# Altium footprint library 2019-09-10_07-03-39.PcbLib: 3 footprints
Each footprint in its own frame and in the unit in brackets; x right, y up, seen from the top. Pads: shape width x height; smd on the part's side, far side on the other; paste and mask are expansions set on the pad; w line width, h text height; cw(c..) or ccw(c..) is an arc to the next point about the centre after c.
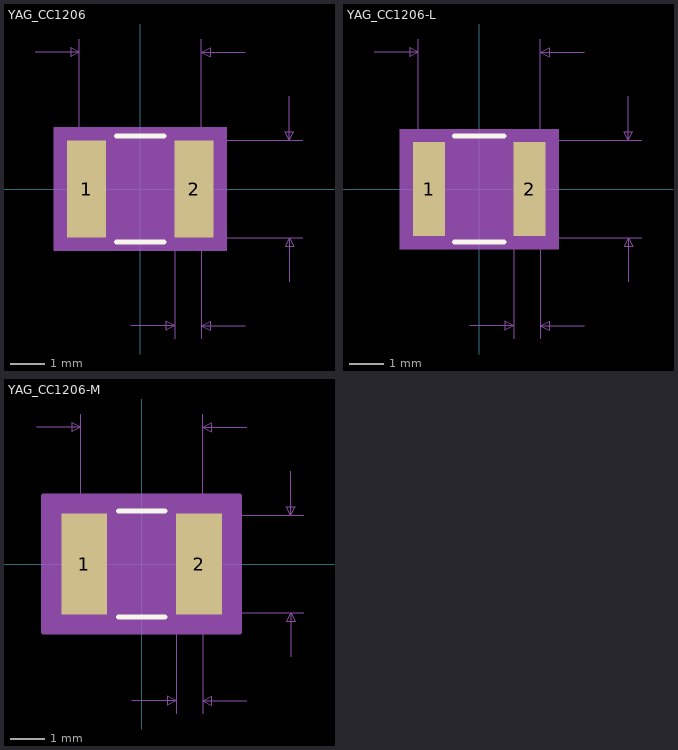
[diagram p0: the footprints below, top view; thin cyan lines are the x and y axes]

## YAG_CC1206 [mil]
pads (2):
  rect 44x110 smd paste+0 mask+0: 1(-61,0) 2(61,0)
Top Overlay:
  lines w6: -26.89,-60 26.89,-60 ; -26.89,60 26.89,60
Mechanical 5:
  region: 98,-70 -98,-70 -98,70 98,70
Mechanical 7:
  lines w1: -119,155 -69,155 ; -69,0 -69,170 ; -11,-155 39,-155 ; 0,-55 184,-55 ; 0,55 184,55 ; 39,-170 39,0 ; 69,-170 69,0 69,170 ; 119,-155 69,-155 ; 119,155 69,155 ; 169,-105 169,-55 ; 169,105 169,55 ; -69,155 -79,160 -79,150 -69,155 ; 39,-155 29,-150 29,-160 39,-155 ; 69,-155 79,-150 79,-160 69,-155 ; 69,155 79,160 79,150 69,155 ; 169,-55 164,-65 174,-65 169,-55 ; 169,55 164,65 174,65 169,55
  text "Default Padstyle: RX44Y110D0T" at -362.5,-325 h50
  text "Alternate 1 Padstyle: OX60Y90D30P" at -412.5,-425 h50
  text "Alternate 2 Padstyle: OX90Y60D30P" at -412.5,-525 h50
  text "0.11in/2.794mm" at 189,-12.5 h25
  text "0.138in/3.505mm" at -93.75,175 h25
  text "0.03in/0.762mm" at -33.5,-200 h25
Mechanical 13:
  lines w1: -69,-55 -69,55 ; -69,-55 -39,-55 -39,55 -69,55 ; -69,-55 69,-55 ; -69,-55 -69,55 ; -69,55 69,55 ; 69,-55 39,-55 39,55 69,55 ; 69,-55 69,55 ; 69,-55 69,55
Mechanical 15:
  region: 93,-65 -93,-65 -93,65 93,65
  lines w6: -93,-65 -93,65 93,65 93,-65 -93,-65
3D body: height 10, standoff 0, extent 0,0 10,10

## YAG_CC1206-L [mil]
pads (2):
  rect 36x106 smd paste+0 mask+0: 1(-57,0) 2(57,0)
Top Overlay:
  lines w6: -27.93,-60 27.93,-60 ; -27.93,60 27.93,60
Mechanical 5:
  region: 90,-68 -90,-68 -90,68 90,68
Mechanical 7:
  lines w1: -119,155 -69,155 ; -69,0 -69,170 ; -11,-155 39,-155 ; 0,-55 184,-55 ; 0,55 184,55 ; 39,-170 39,0 ; 69,-170 69,0 69,170 ; 119,-155 69,-155 ; 119,155 69,155 ; 169,-105 169,-55 ; 169,105 169,55 ; -69,155 -79,160 -79,150 -69,155 ; 39,-155 29,-150 29,-160 39,-155 ; 69,-155 79,-150 79,-160 69,-155 ; 69,155 79,160 79,150 69,155 ; 169,-55 164,-65 174,-65 169,-55 ; 169,55 164,65 174,65 169,55
  text "Default Padstyle: RX36Y106D0T" at -362.5,-323 h50
  text "Alternate 1 Padstyle: OX60Y90D30P" at -412.5,-423 h50
  text "Alternate 2 Padstyle: OX90Y60D30P" at -412.5,-523 h50
  text "0.11in/2.794mm" at 189,-12.5 h25
  text "0.138in/3.505mm" at -93.75,175 h25
  text "0.03in/0.762mm" at -33.5,-200 h25
Mechanical 13:
  lines w1: -69,-55 -69,55 ; -69,-55 -39,-55 -39,55 -69,55 ; -69,-55 69,-55 ; -69,-55 -69,55 ; -69,55 69,55 ; 69,-55 39,-55 39,55 69,55 ; 69,-55 69,55 ; 69,-55 69,55
Mechanical 15:
  region: 79,-57 -79,-57 -79,57 79,57
  lines w6: -79,-57 -79,57 79,57 79,-57 -79,-57
3D body: height 10, standoff 0, extent 0,0 10,10

## YAG_CC1206-M [mil]
pads (2):
  rect 52x114 smd paste+0 mask+0: 1(-65,0) 2(65,0)
Top Overlay:
  lines w6: -26.25,-60 26.25,-60 ; -26.25,60 26.25,60
Mechanical 5:
  region: 106,-72 -106,-72 -106,72 106,72
Mechanical 7:
  lines w1: -119,155 -69,155 ; -69,0 -69,170 ; -11,-155 39,-155 ; 0,-55 184,-55 ; 0,55 184,55 ; 39,-170 39,0 ; 69,-170 69,0 69,170 ; 119,-155 69,-155 ; 119,155 69,155 ; 169,-105 169,-55 ; 169,105 169,55 ; -69,155 -79,160 -79,150 -69,155 ; 39,-155 29,-150 29,-160 39,-155 ; 69,-155 79,-150 79,-160 69,-155 ; 69,155 79,160 79,150 69,155 ; 169,-55 164,-65 174,-65 169,-55 ; 169,55 164,65 174,65 169,55
  text "Default Padstyle: RX52Y114D0T" at -362.5,-327 h50
  text "Alternate 1 Padstyle: OX60Y90D30P" at -412.5,-427 h50
  text "Alternate 2 Padstyle: OX90Y60D30P" at -412.5,-527 h50
  text "0.11in/2.794mm" at 189,-12.5 h25
  text "0.138in/3.505mm" at -93.75,175 h25
  text "0.03in/0.762mm" at -33.5,-200 h25
Mechanical 13:
  lines w1: -69,-55 -69,55 ; -69,-55 -39,-55 -39,55 -69,55 ; -69,-55 69,-55 ; -69,-55 -69,55 ; -69,55 69,55 ; 69,-55 39,-55 39,55 69,55 ; 69,-55 69,55 ; 69,-55 69,55
Mechanical 15:
  region: 111,-77 -111,-77 -111,77 111,77
  lines w6: -111,-77 -111,77 111,77 111,-77 -111,-77
3D body: height 10, standoff 0, extent 0,0 10,10